# Altium footprint library WCAP-FTDB.PcbLib: 32 footprints (part 1 of 2)
Each footprint in its own frame and in the unit in brackets; x right, y up, seen from the top. Pads: shape width x height; smd on the part's side, far side on the other; paste and mask are expansions set on the pad; w line width, h text height; cw(c..) or ccw(c..) is an arc to the next point about the centre after c.
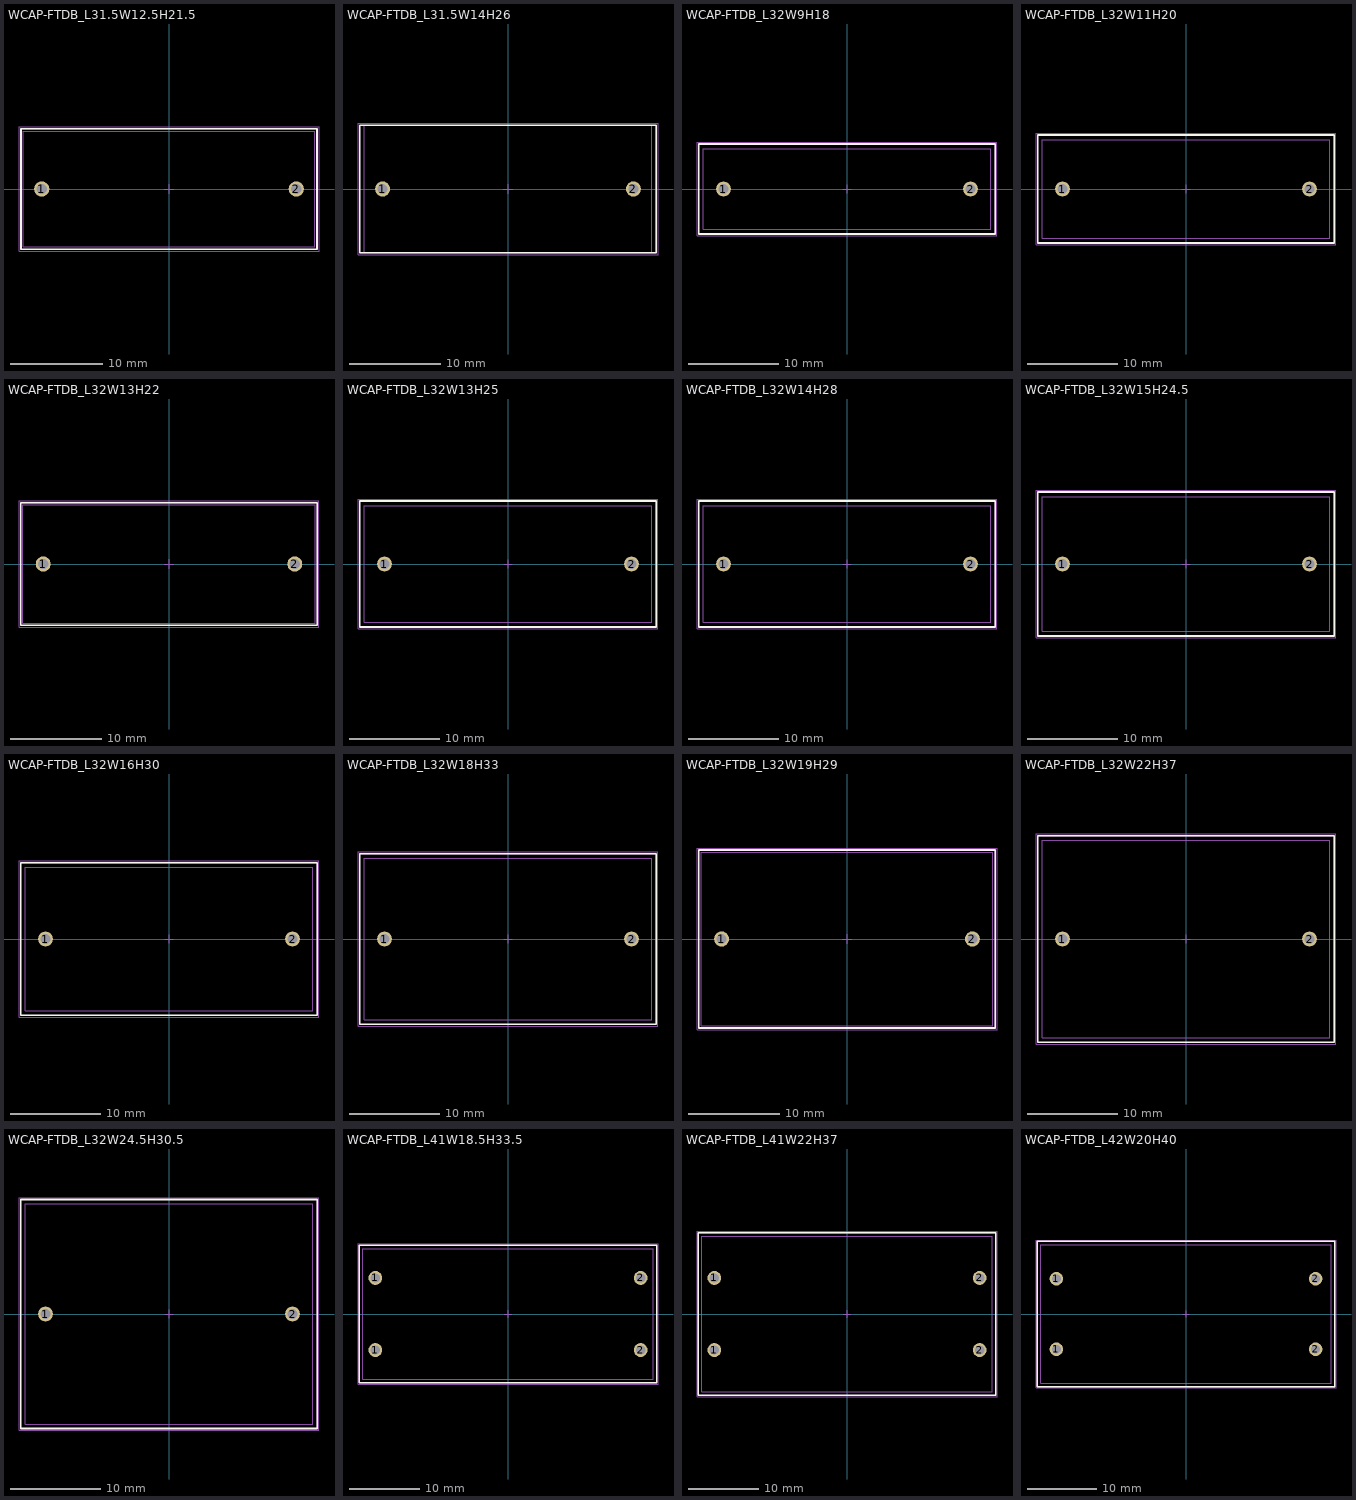
[diagram p0: the footprints below, top view; thin cyan lines are the x and y axes]

## WCAP-FTDB_L31.5W12.5H21.5 [mm] "Film Capacitor, THT, body 31.50 x 12.50mm"
height 21.5
pads (2):
  round 1.65 hole 1.1: 1(-13.75,0) 2(13.75,0)
Top Overlay:
  lines w0.2: -16,-6.5 -16,6.5 16,6.5 16,-6.5 -16,-6.5
Top Assembly:
  lines w0.1: -16,-6.5 -16,6.5 16,6.5 16,-6.5 -16,-6.5
Top Designator:
  text ".Designator" at -3.647,-0.357 h1
Top 3D Body:
  lines w0.1: -15.75,-6.25 -15.75,6.25 15.75,6.25 15.75,-6.25 -15.75,-6.25
Top Courtyard:
  lines w0.05: -16.2,-6.7 -16.2,6.7 16.2,6.7 16.2,-6.7 -16.2,-6.7
Top Component Center:
  lines w0.1: -0.5,0 0.5,0 ; 0,-0.5 0,0.5
3D body "27.5x31.5x12.5x21.5.stp": height 21.55, standoff -3.95, extent -15.75,-6.25 15.75,6.25

## WCAP-FTDB_L31.5W14H26 [mm] "Film Capacitor, THT, body 31.50 x 14.00mm"
height 26
pads (2):
  round 1.65 hole 1.1: 1(-13.75,0) 2(13.75,0)
Top Overlay:
  lines w0.2: -16.25,-7 16.25,-7 16.25,7 -16.25,7 -16.25,-7
Top Assembly:
  lines w0.1: -16.25,-7 16.25,-7 16.25,7 -16.25,7 -16.25,-7
Top Designator:
  text ".Designator" at -3.647,-0.357 h1
Top 3D Body:
  lines w0.1: -15.75,-7.001 15.75,-7.001 15.75,7 -15.75,7 -15.75,-7.001
Top Courtyard:
  lines w0.05: -16.45,-7.2 16.45,-7.2 16.45,7.2 -16.45,7.2 -16.45,-7.2
Top Component Center:
  lines w0.1: -0.5,0 0.5,0 ; 0,-0.5 0,0.5
3D body "27.5x31.5x14.0x26.0.stp": height 26.1, standoff -3.9, extent -15.75,-7.001 15.75,7

## WCAP-FTDB_L32W9H18 [mm] "Film Capacitor, THT, body 32.00x9.00mm"
height 18
pads (2):
  round 1.65 hole 1.1: 1(-13.75,0) 2(13.75,0)
Top Overlay:
  lines w0.2: -16.5,-5 16.5,-5 16.5,5 -16.5,5 -16.5,-5
Top Assembly:
  lines w0.1: -16.5,-5 16.5,-5 16.5,5 -16.5,5 -16.5,-5
Top Designator:
  text ".Designator" at -3.647,-0.357 h1
Top 3D Body:
  lines w0.1: -16,-4.5 16,-4.5 16,4.5 -16,4.5 -16,-4.5
Top Courtyard:
  lines w0.05: -16.7,-5.2 16.7,-5.2 16.7,5.2 -16.7,5.2 -16.7,-5.2
Top Component Center:
  lines w0.1: -0.5,0 0.5,0 ; 0,-0.5 0,0.5
3D body "27.5x32x9x18.stp": height 18.1, standoff -3.9, extent -16,-4.5 16,4.5

## WCAP-FTDB_L32W11H20 [mm] "Film Capacitor, THT, body 32.00x11.00mm"
height 20
pads (2):
  round 1.65 hole 1.1: 1(-13.75,0) 2(13.75,0)
Top Overlay:
  lines w0.2: -16.5,-6 16.5,-6 16.5,6 -16.5,6 -16.5,-6
Top Assembly:
  lines w0.1: -16.5,-6 16.5,-6 16.5,6 -16.5,6 -16.5,-6
Top Designator:
  text ".Designator" at -3.647,-0.357 h1
Top 3D Body:
  lines w0.1: -16,-5.5 16,-5.5 16,5.5 -16,5.5 -16,-5.5
Top Courtyard:
  lines w0.05: -16.7,-6.2 16.7,-6.2 16.7,6.2 -16.7,6.2 -16.7,-6.2
Top Component Center:
  lines w0.1: -0.5,0 0.5,0 ; 0,-0.5 0,0.5
3D body "27.5x32x11x20.stp": height 20, standoff -4, extent -16,-5.5 16,5.5

## WCAP-FTDB_L32W13H22 [mm] "Film Capacitor, THT, body 32.00x13.00mm"
height 22
pads (2):
  round 1.65 hole 1.1: 1(-13.75,0) 2(13.75,0)
Top Overlay:
  lines w0.2: -16.2,-6.7 16.2,-6.7 16.2,6.7 -16.2,6.7 -16.2,-6.7
Top Assembly:
  lines w0.1: -16.2,-6.7 16.2,-6.7 16.2,6.7 -16.2,6.7 -16.2,-6.7
Top Designator:
  text ".Designator" at -3.647,-0.357 h1
Top 3D Body:
  lines w0.1: -16,-6.5 16,-6.5 16,6.5 -16,6.5 -16,-6.5
Top Courtyard:
  lines w0.05: -16.4,-6.9 16.4,-6.9 16.4,6.9 -16.4,6.9 -16.4,-6.9
Top Component Center:
  lines w0.1: -0.5,0 0.5,0 ; 0,-0.5 0,0.5
3D body "27.5x32x13x22.stp": height 22.1, standoff -3.9, extent -16,-6.5 16,6.5

## WCAP-FTDB_L32W13H25 [mm] "Film Capacitor, THT, body 32.00x13.00mm"
height 25
pads (2):
  round 1.65 hole 1.1: 1(-13.75,0) 2(13.75,0)
Top Overlay:
  lines w0.2: -16.5,-7 -16.5,7 16.5,7 16.5,-7 -16.5,-7
Top Assembly:
  lines w0.1: -16.5,-7 -16.5,7 16.5,7 16.5,-7 -16.5,-7
Top Designator:
  text ".Designator" at -3.647,-0.357 h1
Top 3D Body:
  lines w0.1: -16,-6.5 -16,6.5 16,6.5 16,-6.5 -16,-6.5
Top Courtyard:
  lines w0.05: -16.7,-7.2 -16.7,7.2 16.7,7.2 16.7,-7.2 -16.7,-7.2
Top Component Center:
  lines w0.1: -0.5,0 0.5,0 ; 0,-0.5 0,0.5
3D body "27.5x32x13x25.stp": height 25.05, standoff -3.95, extent -16,-6.5 16,6.5

## WCAP-FTDB_L32W14H28 [mm] "Film Capacitor, THT, body 32.00x13.00mm"
height 25
pads (2):
  round 1.65 hole 1.1: 1(-13.75,0) 2(13.75,0)
Top Overlay:
  lines w0.2: -16.5,-7 -16.5,7 16.5,7 16.5,-7 -16.5,-7
Top Assembly:
  lines w0.1: -16.5,-7 -16.5,7 16.5,7 16.5,-7 -16.5,-7
Top Designator:
  text ".Designator" at -3.647,-0.357 h1
Top 3D Body:
  lines w0.1: -16,-6.5 -16,6.5 16,6.5 16,-6.5 -16,-6.5
Top Courtyard:
  lines w0.05: -16.7,-7.2 -16.7,7.2 16.7,7.2 16.7,-7.2 -16.7,-7.2
Top Component Center:
  lines w0.1: -0.5,0 0.5,0 ; 0,-0.5 0,0.5
3D body "27.5x32x13x25.stp": height 25.05, standoff -3.95, extent -16,-6.5 16,6.5

## WCAP-FTDB_L32W15H24.5 [mm] "Film Capacitor, THT, body 32.00x15.00mm"
height 24.5
pads (2):
  round 1.65 hole 1.1: 1(-13.75,0) 2(13.75,0)
Top Overlay:
  lines w0.2: -16.5,-8 16.5,-8 16.5,8 -16.5,8 -16.5,-8
Top Assembly:
  lines w0.1: -16.5,-8 -16.5,8 16.5,8 16.5,-8 -16.5,-8
Top Designator:
  text ".Designator" at -3.647,-0.357 h1
Top 3D Body:
  lines w0.1: -16,-7.5 16,-7.5 16,7.5 -16,7.5 -16,-7.5
Top Courtyard:
  lines w0.05: -16.7,-8.2 16.7,-8.2 16.7,8.2 -16.7,8.2 -16.7,-8.2
Top Component Center:
  lines w0.1: -0.5,0 0.5,0 ; 0,-0.5 0,0.5
3D body "27.5x32x15x24.5.stp": height 24.75, standoff -3.9, extent -16,-7.5 16,7.5

## WCAP-FTDB_L32W16H30 [mm] "Film Capacitor, THT, body 32.00x16.00mm"
height 30
pads (2):
  round 1.65 hole 1.1: 1(-13.75,0) 2(13.75,0)
Top Overlay:
  lines w0.2: -16.5,-8.5 16.5,-8.5 16.5,8.5 -16.5,8.5 -16.5,-8.5
Top Assembly:
  lines w0.1: -16.5,-8.5 16.5,-8.5 16.5,8.5 -16.5,8.5 -16.5,-8.5
Top Designator:
  text ".Designator" at -3.647,-0.357 h1
Top 3D Body:
  lines w0.1: -16,-8 16,-8 16,8 -16,8 -16,-8
Top Courtyard:
  lines w0.05: -16.7,-8.7 16.7,-8.7 16.7,8.7 -16.7,8.7 -16.7,-8.7
Top Component Center:
  lines w0.1: -0.5,0 0.5,0 ; 0,-0.5 0,0.5
3D body "27.5x32x16x30.stp": height 30.1, standoff -4.05, extent -16,-8 16,8

## WCAP-FTDB_L32W18H33 [mm] "Film Capacitor, THT, body 32.00x18.00mm"
height 33
pads (2):
  round 1.65 hole 1.1: 1(-13.75,0) 2(13.75,0)
Top Overlay:
  lines w0.2: -16.5,-9.5 -16.5,9.5 16.5,9.5 16.5,-9.5 -16.5,-9.5
Top Assembly:
  lines w0.1: -16.5,-9.5 -16.5,9.5 16.5,9.5 16.5,-9.5 -16.5,-9.5
Top Designator:
  text ".Designator" at -3.647,-0.357 h1
Top 3D Body:
  lines w0.1: -16,-9 -16,9 16,9 16,-9 -16,-9
Top Courtyard:
  lines w0.05: -16.7,-9.7 -16.7,9.7 16.7,9.7 16.7,-9.7 -16.7,-9.7
Top Component Center:
  lines w0.1: -0.5,0 0.5,0 ; 0,-0.5 0,0.5
3D body "27.5x32x18x33.stp": height 33.15, standoff -3.85, extent -16,-9 16,9

## WCAP-FTDB_L32W19H29 [mm] "Film Capacitor, THT, body 32.00x19.00mm"
height 29
pads (2):
  round 1.65 hole 1.1: 1(-13.75,0) 2(13.75,0)
Top Overlay:
  lines w0.2: -16.25,-9.75 -16.25,9.75 16.25,9.75 16.25,-9.75 -16.25,-9.75
Top Assembly:
  lines w0.1: -16.25,-9.75 -16.25,9.75 16.25,9.75 16.25,-9.75 -16.25,-9.75
Top Designator:
  text ".Designator" at -3.647,-0.357 h1
Top 3D Body:
  lines w0.1: -16,-9.5 -16,9.5 16,9.5 16,-9.5 -16,-9.5
Top Courtyard:
  lines w0.05: -16.45,-9.95 -16.45,9.95 16.45,9.95 16.45,-9.95 -16.45,-9.95
Top Component Center:
  lines w0.1: -0.5,0 0.5,0 ; 0,-0.5 0,0.5
3D body "27.5x32x19x29.stp": height 29.2, standoff -3.95, extent -16,-9.5 16,9.5

## WCAP-FTDB_L32W22H37 [mm] "Film Capacitor, THT, body 32.00x22.00mm"
height 37
pads (2):
  round 1.65 hole 1.1: 1(-13.75,0) 2(13.75,0)
Top Overlay:
  lines w0.2: -16.5,-11.5 -16.5,11.5 16.5,11.5 16.5,-11.5 -16.5,-11.5
Top Assembly:
  lines w0.1: -16.5,-11.5 -16.5,11.5 16.5,11.5 16.5,-11.5 -16.5,-11.5
Top Designator:
  text ".Designator" at -3.647,-0.357 h1
Top 3D Body:
  lines w0.1: -16,-11 -16,11 16,11 16,-11 -16,-11
Top Courtyard:
  lines w0.05: -16.7,-11.7 -16.7,11.7 16.7,11.7 16.7,-11.7 -16.7,-11.7
Top Component Center:
  lines w0.1: -0.5,0 0.5,0 ; 0,-0.5 0,0.5
3D body "27.5x32x22x37.stp": height 37.2, standoff -3.95, extent -16,-11 16,11

## WCAP-FTDB_L32W24.5H30.5 [mm] "Film Capacitor, THT, body 32.00x24.50mm"
height 30.5
pads (2):
  round 1.65 hole 1.1: 1(-13.75,0) 2(13.75,0)
Top Overlay:
  lines w0.2: -16.5,-12.75 16.5,-12.75 16.5,12.75 -16.5,12.75 -16.5,-12.75
Top Assembly:
  lines w0.1: -16.5,-12.75 16.5,-12.75 16.5,12.75 -16.5,12.75 -16.5,-12.75
Top Designator:
  text ".Designator" at -3.647,-0.357 h1
Top 3D Body:
  lines w0.1: -16,-12.25 16,-12.25 16,12.25 -16,12.25 -16,-12.25
Top Courtyard:
  lines w0.05: -16.7,-12.95 16.7,-12.95 16.7,12.95 -16.7,12.95 -16.7,-12.95
Top Component Center:
  lines w0.1: -0.5,0 0.5,0 ; 0,-0.5 0,0.5
3D body "27.5x32x24,5x30.5.stp": height 30.6, standoff -3.9, extent -16,-12.25 16,12.25

## WCAP-FTDB_L41W18.5H33.5 [mm] "Film Capacitor, THT, body 41.00 x 18.50mm"
height 33.5
pads (4):
  round 1.95 hole 1.3: 1(-18.75,-5.1) 1(-18.75,5.1) 2(18.75,-5.1) 2(18.75,5.1)
Top Overlay:
  lines w0.2: -21,-9.75 -21,9.75 21,9.75 21,-9.75 -21,-9.75
Top Assembly:
  lines w0.1: -21,-9.75 -21,9.75 21,9.75 21,-9.75 -21,-9.75
Top Designator:
  text ".Designator" at -3.647,-0.357 h1
Top 3D Body:
  lines w0.1: -20.5,-9.25 -20.5,9.25 20.5,9.25 20.5,-9.25 -20.5,-9.25
Top Courtyard:
  lines w0.05: -21.2,-9.95 21.2,-9.95 21.2,9.95 -21.2,9.95 -21.2,-9.95
Top Component Center:
  lines w0.1: -0.5,0 0.5,0 ; 0,-0.5 0,0.5
3D body "37.5x41x18.5x33.5.stp": height 33.7, standoff -3.8, extent -20.5,-9.25 20.5,9.25

## WCAP-FTDB_L41W22H37 [mm] "Film Capacitor, THT, body 41.00 x 22.00mm"
height 37
pads (4):
  round 1.95 hole 1.3: 1(-18.75,-5.1) 1(-18.75,5.1) 2(18.75,-5.1) 2(18.75,5.1)
Top Overlay:
  lines w0.2: -21,-11.5 21,-11.5 21,11.5 -21,11.5 -21,-11.5
Top Assembly:
  lines w0.1: -21,-11.5 21,-11.5 21,11.5 -21,11.5 -21,-11.5
Top Designator:
  text ".Designator" at -3.647,-0.357 h1
Top 3D Body:
  lines w0.1: -20.5,-11 20.5,-11 20.5,11 -20.5,11 -20.5,-11
Top Courtyard:
  lines w0.05: -21.2,-11.7 -21.2,11.7 21.2,11.7 21.2,-11.7 -21.2,-11.7
Top Component Center:
  lines w0.1: -0.5,0 0.5,0 ; 0,-0.5 0,0.5
3D body "37.5x41x22x37.stp": height 37.2, standoff -3.8, extent -20.5,-11 20.5,11

## WCAP-FTDB_L42W20H40 [mm] "Film Capacitor, THT, body 42.00x20.00mm"
height 40
pads (4):
  round 1.95 hole 1.3: 1(-18.75,-5.1) 1(-18.75,5.1) 2(18.75,-5.1) 2(18.75,5.1)
Top Overlay:
  lines w0.2: -21.5,-10.5 -21.5,10.5 21.5,10.5 21.5,-10.5 -21.5,-10.5
Top Assembly:
  lines w0.1: -21.5,-10.5 -21.5,10.5 21.5,10.5 21.5,-10.5 -21.5,-10.5
Top Designator:
  text ".Designator" at -3.647,-0.357 h1
Top 3D Body:
  lines w0.1: -21,-10 -21,10 21,10 21,-10 -21,-10
Top Courtyard:
  lines w0.05: -21.7,-10.7 -21.7,10.7 21.7,10.7 21.7,-10.7 -21.7,-10.7
Top Component Center:
  lines w0.1: -0.5,0 0.5,0 ; 0,-0.5 0,0.5
3D body "37.5x42x20x40.stp": height 40.05, standoff -3.95, extent -21,-10 21,10